# Altium footprint library INF-PG-TSDSON-8-2-V.PcbLib: 1 footprints
Each footprint in its own frame and in the unit in brackets; x right, y up, seen from the top. Pads: shape width x height; smd on the part's side, far side on the other; paste and mask are expansions set on the pad; w line width, h text height; cw(c..) or ccw(c..) is an arc to the next point about the centre after c.
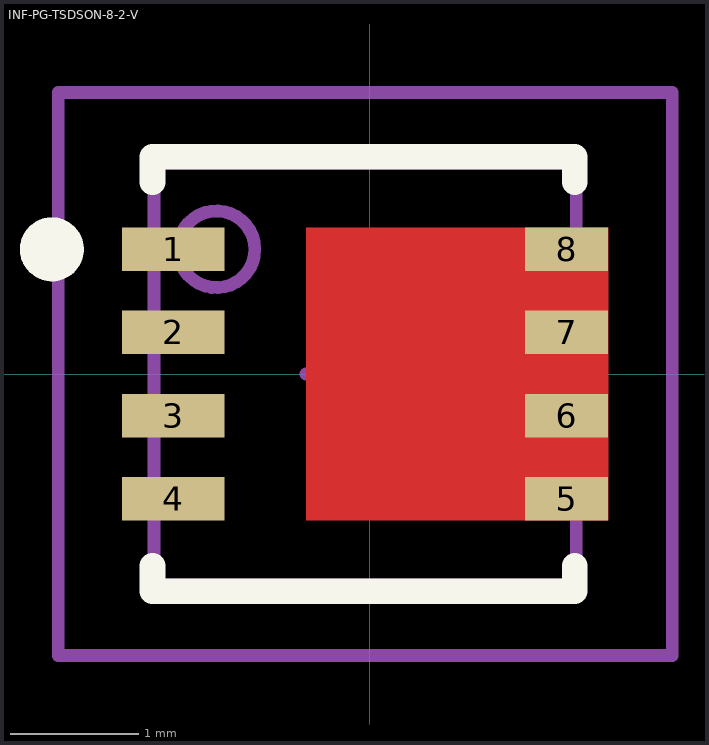
[diagram p0: the footprint, top view; thin cyan lines are the x and y axes]

## INF-PG-TSDSON-8-2-V [mm] "SON, SMD, 0.65 mm pitch, 8 pin, 3.3 mm L X 3.3 mm W X 1.10 mm H body"
height 1.1
pads (8):
  rect 0.8x0.34 smd paste-0.17 mask+0: 1(-1.537,0.975) 2(-1.537,0.325) 3(-1.537,-0.325) 4(-1.537,-0.975)
  rect 0.65x0.34 smd paste-0.17 mask+0: 5(1.538,-0.975) 6(1.538,-0.325) 7(1.538,0.325) 8(1.538,0.975)
Top Layer:
  region: 1.862,1.145 -0.498,1.145 -0.498,-1.145 1.862,-1.145
Top Overlay:
  circle w0.25: c-2.487,0.975 r0.125
  lines w0.2: -1.7,-1.5 -1.7,-1.7 1.6,-1.7 1.6,-1.5 ; -1.7,1.5 -1.7,1.7 1.6,1.7 1.6,1.5
Top Paste:
  drawing of 11 lines, arcs and shapes, not listed
Top Solder:
  region: 1.212,1.145 -0.498,1.145 -0.498,-1.145 1.212,-1.145
M3 (ASY_Text_Top):
  text ".DESIGNATOR" at 0,0 h1.2
M13 (CMP_Body_OTL_Top):
  circle w0.1: c-1.2,0.975 r0.3
  lines w0.1: -1.687,-1.65 -1.687,1.65 1.613,1.65 1.613,-1.65 -1.687,-1.65
M15 (CMP_Courtyard_Top):
  lines w0.1: -0.5,0 0.5,0 ; 0,-0.5 0,0.5 ; -2.437,-2.2 -2.437,2.2 2.363,2.2 2.363,-2.2 -2.437,-2.2
3D body "PG-TSDSON-8-2_Z8B00133212_V04_3D.stp": height 1.01, standoff 0, extent -1.687,-1.65 1.613,1.65